# Altium footprint library CHIP-Library.PcbLib: 345 footprints (part 16 of 22)
Each footprint in its own frame and in the unit in brackets; x right, y up, seen from the top. Pads: shape width x height; smd on the part's side, far side on the other; paste and mask are expansions set on the pad; w line width, h text height; cw(c..) or ccw(c..) is an arc to the next point about the centre after c.
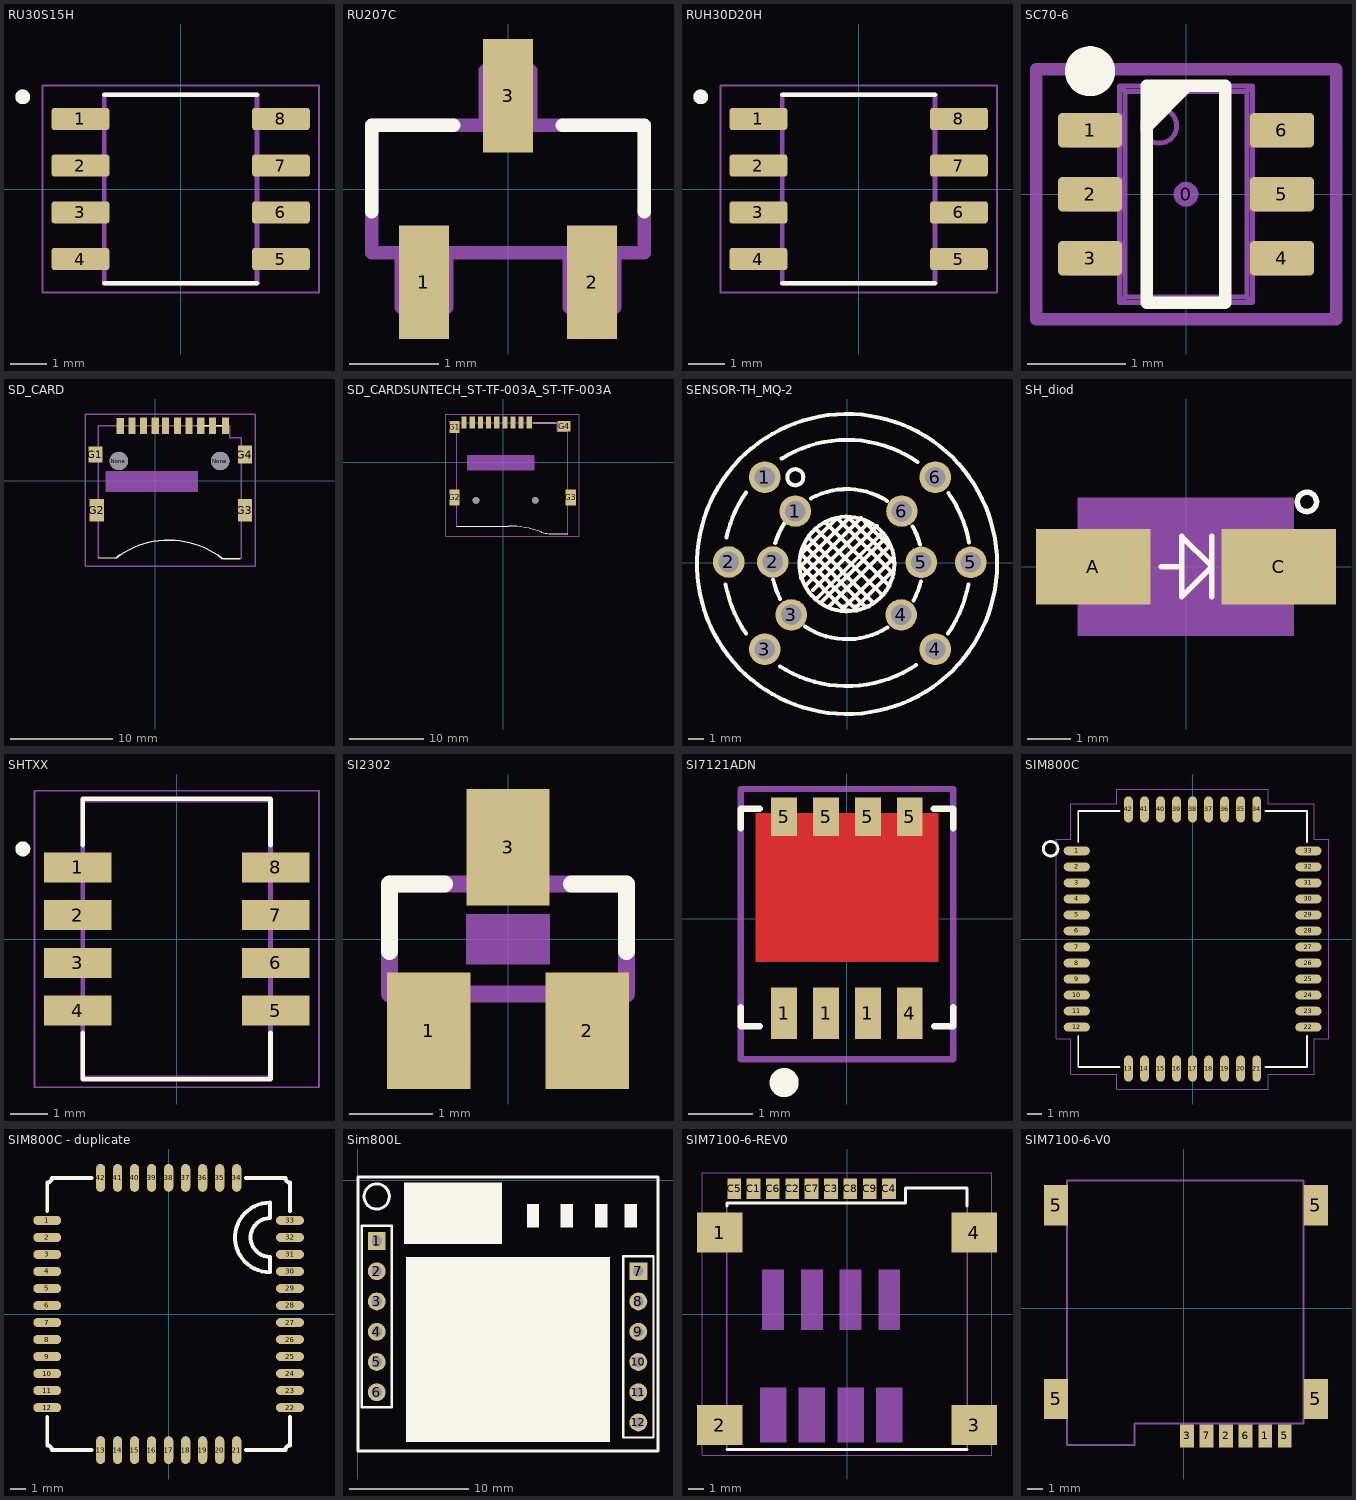
[diagram p15: the footprints below, top view; thin cyan lines are the x and y axes]

## RU30S15H [mm] "DUAL P Mosfet SOP-8"
pads (8):
  rrect25% 1.57x0.6 smd: 1(-2.725,1.905) 2(-2.725,0.635) 3(-2.725,-0.635) 4(-2.725,-1.905) 5(2.725,-1.905) 6(2.725,-0.635) 7(2.725,0.635) 8(2.725,1.905)
Top Overlay:
  circle w0.2: c-4.295,2.505 r0.1
  lines w0.127: -2.075,-2.565 2.075,-2.565 ; -2.075,2.565 2.075,2.565
Mechanical 13:
  circle w0.2: c-4.295,2.505 r0.1
  lines w0.127: -2.075,-2.565 2.075,-2.565 2.075,2.565 -2.075,2.565 -2.075,-2.565
Mechanical 15:
  lines w0.05: -3.76,-2.815 3.76,-2.815 3.76,2.815 -3.76,2.815 -3.76,-2.815
3D body "step_temp.STEP": height 1.79, standoff -0.01, extent -3,-2.46 3,2.46

## RU207C [mil] "N-Channel Advanced Power MOSFET  SOT23-3"
pads (3):
  rect 22x50 smd: 1(-37,-41) 2(37,-41) 3(0,41)
Top Overlay:
  lines w6: -60,-10 -60,28 -24,28 ; 24,28 60,28 60,-10
Mechanical 4:
  lines w6: -60,-28 -60,28 ; -60,-28 60,-28 ; -60,-28 -60,28 ; -60,-28 60,-28 ; -60,28 60,28 ; -60,28 60,28 ; -47,-52 -27,-52 ; -47,-52 -47,-28 ; -47,-52 -27,-52 ; -47,-52 -47,-28 ; -47,-28 -27,-28 ; -47,-28 -27,-28 ; -27,-52 -27,-28 ; -27,-52 -27,-28 ; -10,28 -10,52 ; -10,28 10,28 ; -10,28 -10,52 ; -10,28 10,28 ; -10,52 10,52 ; -10,52 10,52 ; 10,28 10,52 ; 10,28 10,52 ; 27,-52 47,-52 ; 27,-52 27,-28 ; 27,-52 47,-52 ; 27,-52 27,-28 ; 27,-28 47,-28 ; 27,-28 47,-28 ; 47,-52 47,-28 ; 47,-52 47,-28 ; 60,-28 60,28 ; 60,-28 60,28
3D body "CircuitWorks-SOT-23.step": height 43.81, standoff 0.5, extent -59.06,-54.21 59.05,44.21

## RUH30D20H [mm] "DUAL P Mosfet SOP-8"
pads (8):
  rrect25% 1.57x0.6 smd: 1(-2.725,1.905) 2(-2.725,0.635) 3(-2.725,-0.635) 4(-2.725,-1.905) 5(2.725,-1.905) 6(2.725,-0.635) 7(2.725,0.635) 8(2.725,1.905)
Top Overlay:
  circle w0.2: c-4.295,2.505 r0.1
  lines w0.127: -2.075,-2.565 2.075,-2.565 ; -2.075,2.565 2.075,2.565
Mechanical 13:
  circle w0.2: c-4.295,2.505 r0.1
  lines w0.127: -2.075,-2.565 2.075,-2.565 2.075,2.565 -2.075,2.565 -2.075,-2.565
Mechanical 15:
  lines w0.05: -3.76,-2.815 3.76,-2.815 3.76,2.815 -3.76,2.815 -3.76,-2.815
3D body "step_temp.STEP": height 1.79, standoff -0.01, extent -3,-2.46 3,2.46

## SC70-6 [mm] "SC70-6; SOT-363"
height 1.6
pads (7):
  round 0.254 on Mech15: 0(0,0)
  rrect25% 0.65x0.35 smd: 1(-0.975,0.65) 2(-0.975,0) 3(-0.975,-0.65) 4(0.975,-0.65) 5(0.975,0) 6(0.975,0.65)
Top Overlay:
  circle w0.254: c-0.975,1.25 r0.127
  region: 0.1,1.1 -0.4,0.6 -0.4,1.1
  lines w0.127: -0.4,-1.1 0.4,-1.1 0.4,1.1 -0.4,1.1 -0.4,-1.1
Mechanical 13:
  circle w0.05: c-0.27,0.695 r0.175
  lines w0.05: -1.028,-0.8 -1.028,-0.5 ; -1.028,-0.15 -1.028,0.15 ; -1.028,0.5 -1.028,0.8 ; -0.937,-0.8 -0.937,-0.5 ; -0.937,-0.15 -0.937,0.15 ; -0.937,0.5 -0.937,0.8 ; -0.925,-0.8 -0.925,-0.5 ; -0.925,-0.15 -0.925,0.15 ; -0.925,0.5 -0.925,0.8 ; 0.925,-0.8 0.925,-0.5 ; 0.925,-0.15 0.925,0.15 ; 0.925,0.5 0.925,0.8 ; 0.937,-0.8 0.937,-0.5 ; 0.937,-0.15 0.937,0.15 ; 0.937,0.5 0.937,0.8 ; 1.028,-0.8 1.028,-0.5 ; 1.028,-0.15 1.028,0.15 ; 1.028,0.5 1.028,0.8 ; -0.675,-1.1 -0.619,-1.044 ; -0.675,-1.1 -0.675,1.1 ; -0.675,-1.1 0.675,-1.1 ; -0.675,1.1 -0.619,1.044 ; -0.675,1.1 0.675,1.1 ; -0.619,-1.044 -0.619,1.044 ; -0.619,-1.044 0.619,-1.044 ; -0.619,1.044 0.619,1.044 ; 0.619,-1.044 0.619,1.044 ; 0.619,-1.044 0.675,-1.1 ; 0.619,1.044 0.675,1.1 ; 0.675,-1.1 0.675,1.1 ; -1.2,-0.8 -0.654,-0.8 -0.654,-0.5 -1.2,-0.5 -1.2,-0.8 ; -1.2,-0.15 -0.654,-0.15 -0.654,0.15 -1.2,0.15 -1.2,-0.15 ; -1.2,0.5 -0.654,0.5 -0.654,0.8 -1.2,0.8 -1.2,0.5 ; 0.654,-0.8 0.654,-0.5 1.2,-0.5 1.2,-0.8 0.654,-0.8 ; 0.654,-0.15 0.654,0.15 1.2,0.15 1.2,-0.15 0.654,-0.15 ; 0.654,0.5 0.654,0.8 1.2,0.8 1.2,0.5 0.654,0.5
Mechanical 15:
  lines w0.127: -1.524,-1.27 1.524,-1.27 1.524,1.27 -1.524,1.27 -1.524,-1.27
3D body "SOT363.STEP": height 1.1, standoff 0, extent -1.2,-1.1 1.2,1.1

## SD_CARD [mm]
pads (16):
  rect 0.7x1.6 smd: 1(4.445,5.334) 2(3.302,5.334) 3(2.159,5.334) 4(1.016,5.334) 5(0,5.334) 6(-1.143,5.334) 7(-2.286,5.334) 8(-3.429,5.33) CD1(6.858,5.334) CD2(5.588,5.334)
  rect 1.4x1.6 smd: G1(-5.842,2.54)
  rect 1.4x2.2 smd: G2(-5.715,-2.921) G3(8.763,-2.921)
  rect 1.4x1.8 smd: G4(8.763,2.54)
  round 1.8 hole 1.8 unplated: None(-3.556,1.905) None(6.35,1.905)
Top Overlay:
  lines w0.127: -5.535,-7.536 -3.825,-7.575 ; -3.824,-7.556 cw(c1.321,-14.322) 6.554,-7.624 ; 4.07,5.33 7.17,5.33 ; 6.604,-7.624 8.318,-7.624
Mechanical 1:
  region: 4.173,0.927 4.173,-1.076 -4.836,-1.076 -4.836,0.927
  lines w0.127: -5.588,-7.575 -5.588,5.33 7.302,5.33 7.302,4.187 8.382,4.187 8.382,-7.624 ; -6.858,-8.382 9.779,-8.382 9.779,6.5 -6.858,6.5 -6.858,-8.382
3D body "User Library-Socket-MicroSD-Type1.step": height 1.71, standoff -0.54, extent -5.653,-7.574 8.447,6.026

## SD_CARDSUNTECH_ST-TF-003A_ST-TF-003A [mm]
pads (15):
  rect 0.7x1.6 smd: 1(3.52,5.33) 2(2.42,5.33) 3(1.32,5.33) 4(0.22,5.33) 5(-0.88,5.33) 6(-1.98,5.33) 7(-3.08,5.33) 8(-4.18,5.33) 9(-5.28,5.33)
  rect 1.4x1.6 smd: G1(-6.58,4.73)
  rect 1.4x2.2 smd: G2(-6.58,-4.77) G3(9.12,-4.77)
  rect 1.8x1.4 smd: G4(8.22,4.83)
  round 0.9 hole 0.9 unplated: None(-3.68,-5.17) None(4.32,-5.17)
Top Overlay:
  lines w0.127: -6.287,-8.64 0.647,-8.64 cw(c0.647,-21.34) 5.198,-9.484 ; 4.07,5.33 7.17,5.33 ; 5.161,-9.469 ccw(c6.168,-6.847) 6.168,-9.656 8.699,-9.656
Mechanical 1:
  region: 4.173,0.927 4.173,-1.076 -4.836,-1.076 -4.836,0.927
  lines w0.127: -6.287,-8.64 -6.287,5.33 7.302,5.33 7.302,4.187 8.699,4.187 8.699,-9.656 ; -7.75,-10 -7.75,6.5 10.25,6.5 10.25,-10 -7.75,-10
3D body "User Library-XKXFS-N02-XXT.STEP": height 1.78, standoff -0.62, extent -6.93,-9.412 9.47,5.588
3D body "User Library-Micro_SD.step": height 1.46, standoff 0.48, extent -4.712,-11.107 6.288,3.893

## SENSOR-TH_MQ-2 [mm]
pads (12):
  round 2 hole 1.3 paste-2539.97 mask+0.051: 1(-5.207,5.43) 1(-3.277,3.289) 2(-7.493,0.064) 2(-4.699,0.064) 3(-5.207,-5.461) 3(-3.531,-3.289) 4(3.429,-3.289) 4(5.588,-5.461) 5(4.699,0.038) 5(7.833,0.038) 6(3.48,3.289) 6(5.588,5.43)
Top Overlay:
  circle w0.254: c0,-0.064 r9.5
  circle w0.254: c-3.277,5.43 r0.508
  circle w0.254: c0,-0.064 r3
  lines w0.254: -7.682,-1.355 ccw(c0,0) -6.39,-4.474 ; -7.63,1.622 cw(c0,0) -6.39,4.474 ; -4.674,-1.041 ccw(c0,-0.063) -4.235,-2.269 ; -4.544,1.267 cw(c0,-0.064) -3.988,2.489 ; -4.248,-6.542 ccw(c0,0) 4.362,-6.466 ; -4.133,6.615 cw(c0,0) 4.474,6.389 ; -2.911,-0.963 0.899,2.847 ; -2.667,-4.013 ccw(c0,-0.063) 2.574,-4.074 ; -2.657,-1.471 1.407,2.593 ; -2.657,1.069 1.153,-2.741 1.407,-2.741 ; -2.403,1.577 1.661,-2.487 ; -2.276,4.093 cw(c0,-0.063) 2.54,3.937 ; -2.149,-1.725 1.915,2.339 ; -1.895,-2.233 2.169,1.831 ; -1.895,2.085 2.169,-1.979 ; -1.641,-2.487 2.423,1.577 ; -1.387,2.593 2.677,-1.471 ; -1.133,-2.741 2.677,1.069 1.153,2.593 ; -0.371,-2.741 -0.117,-2.741 2.931,0.307 ; 0.137,-2.995 -0.117,-2.995 -2.911,-0.201 0.137,2.847 2.931,0.053 ; 0.391,-2.741 0.645,-2.741 2.931,-0.455 ; 0.645,-2.995 -2.911,0.561 -0.625,2.847 2.931,-0.709 ; 4.161,2.297 cw(c0,-0.063) 4.623,1.168 ; 4.216,-2.362 ccw(c0,-0.063) 4.673,-1.17 ; 6.39,-4.474 ccw(c0,0) 7.682,-1.355 ; 6.43,4.421 cw(c0.041,-0.053) 7.722,1.301
3D body "User Library-MQ-5.step": height 31.06, standoff 8, extent -9.5,-9.551 9.5,9.424
3D body "User Library-socket-7.step": height 12.16, standoff -3.48, extent -8.363,-8.436 8.637,8.543

## SH_diod [mm]
pads (2):
  rect 2.65x1.75 smd: A(-2.15,0) C(2.15,0)
Top Overlay:
  circle w0.127: c2.8,1.5 r0.224
  lines w0.127: -0.573,0 -0.1,0 ; 0.6,-0.7 0.6,0 ; 0.6,0.7 0.6,0 ; -0.1,0 -0.1,-0.7 0.6,0 ; -0.1,0 -0.1,0.7 0.6,0
Mechanical 4:
  region: -0.501,0.9 0.5,0.9 0.5,-0.901 -0.501,-0.901
  region: -0.501,0.9 0.5,0.9 0.5,-0.901 -0.501,-0.901
  lines w0.127: -2.375,-1.475 -2.375,1.475 ; -2.375,-1.475 2.375,-1.475 ; -2.375,-1.475 -2.375,1.475 ; -2.375,-1.475 2.375,-1.475 ; -2.375,1.475 2.375,1.475 ; -2.375,1.475 2.375,1.475 ; 2.375,-1.475 2.375,1.475 ; 2.375,-1.475 2.375,1.475
Mechanical 16:
  region: -2.502,1.6 2.5,1.6 2.5,-1.601 -2.502,-1.601
3D body "User Library-DFLS220-POWERDI-123.step": height 1.16, standoff 0.01, extent -1.75,-0.89 2.15,0.89

## SHTXX [mm]
pads (8):
  rect 1.8x0.8 smd: 1(-2.64,1.905) 2(-2.64,0.635) 3(-2.64,-0.635) 4(-2.64,-1.905) 5(2.64,-1.905) 6(2.64,-0.635) 7(2.64,0.635) 8(2.64,1.905)
Top Overlay:
  circle w0.2: c-4.1,2.4 r0.1
  lines w0.127: -2.5,-2.5 -2.5,-3.735 2.5,-3.735 2.5,-2.5 ; -2.5,2.5 -2.5,3.735 2.5,3.735 2.5,2.5
Mechanical 4:
  lines w0.127: -2.5,-3.7 2.5,-3.7 ; -2.5,-3.7 -2.5,3.7 ; -2.5,-3.7 2.5,-3.7 ; -2.5,-3.7 -2.5,3.7 ; -2.5,3.7 2.5,3.7 ; -2.5,3.7 2.5,3.7 ; 2.5,-3.7 2.5,3.7 ; 2.5,-3.7 2.5,3.7
Mechanical 16:
  lines w0.05: -3.79,-3.95 -3.79,3.95 3.79,3.95 3.79,-3.95 -3.79,-3.95
3D body "User Library-SHT1x.step": height 2.36, standoff 0, extent -2.413,-3.735 2.517,3.735

## SI2302 [mm]
pads (3):
  rect 1x1.4 smd: 1(-0.95,-1.1) 2(0.95,-1.1) 3(0,1.1)
Top Overlay:
  lines w0.203: -1.422,-0.152 -1.422,0.66 -0.764,0.66 ; 0.764,0.66 1.422,0.66 1.422,-0.152
Mechanical 4:
  region: -0.5,0.3 0.5,0.3 0.5,-0.3 -0.5,-0.3
  region: -0.229,1.295 0.229,1.295 0.229,0.712 -0.229,0.712
  region: 0.711,-0.711 1.168,-0.711 1.168,-1.295 0.711,-1.295
  region: -1.169,-0.711 -0.711,-0.711 -0.711,-1.296 -1.169,-1.296
  region: -0.5,0.3 0.5,0.3 0.5,-0.3 -0.5,-0.3
  region: -0.229,1.295 0.229,1.295 0.229,0.712 -0.229,0.712
  region: 0.711,-0.711 1.168,-0.711 1.168,-1.295 0.711,-1.295
  region: -1.169,-0.711 -0.711,-0.711 -0.711,-1.296 -1.169,-1.296
  lines w0.203: -1.422,-0.66 1.422,-0.66 ; -1.422,-0.66 -1.422,0.66 ; -1.422,-0.66 1.422,-0.66 ; -1.422,-0.66 -1.422,0.66 ; -1.422,0.66 1.422,0.66 ; -1.422,0.66 1.422,0.66 ; 1.422,-0.66 1.422,0.66 ; 1.422,-0.66 1.422,0.66
3D body "CircuitWorks-SOT-23.step": height 1.11, standoff 0.01, extent -1.5,-1.377 1.5,1.123

## SI7121ADN [mm] "PDFN3X3-8"
pads (8):
  rect 0.4x0.8 smd: 1(-0.975,-1.465) 1(-0.325,-1.465) 1(0.325,-1.465) 4(0.975,-1.465)
  rect 0.4x0.6 smd: 5(-0.975,1.585) 5(-0.325,1.585) 5(0.325,1.585) 5(0.975,1.585)
Top Layer:
  region: -1.415,-0.665 1.415,-0.665 1.415,1.635 -1.415,1.635
Top Overlay:
  circle w0.25: c-0.975,-2.54 r0.1
  lines w0.1: -1.65,-1.368 -1.65,-1.668 -1.35,-1.668 ; -1.65,1.406 -1.65,1.706 -1.35,1.706 ; 1.35,1.706 1.65,1.706 1.65,1.406 ; 1.351,-1.668 1.651,-1.668 1.651,-1.368
Top Paste:
  region: 0.125,-0.664 1.415,-0.664 1.415,1.636 0.125,1.636
  region: -1.415,-0.665 -0.125,-0.665 -0.125,1.635 -1.415,1.635
Top Solder:
  region: 0.125,-0.664 1.415,-0.664 1.415,1.636 0.125,1.636
  region: -1.415,-0.665 -0.125,-0.665 -0.125,1.635 -1.415,1.635
Mechanical 15:
  lines w0.1: -1.65,-2.176 1.65,-2.176 1.65,2.015 -1.65,2.015 -1.65,-2.176
3D body "CSD17575Q3.STEP": height 1.1, standoff 0, extent -1.65,-1.65 1.65,1.65

## SIM800C [mm]
pads (42):
  oval 1.8x0.6 smd: 1(-7.95,6.05) 2(-7.95,4.95) 3(-7.95,3.85) 4(-7.95,2.75) 5(-7.95,1.65) 6(-7.95,0.55) 7(-7.95,-0.55) 8(-7.95,-1.65) 9(-7.95,-2.75) 10(-7.95,-3.85) 11(-7.95,-4.95) 12(-7.95,-6.05) 22(7.95,-6.05) 23(7.95,-4.95) 24(7.95,-3.85) 25(7.95,-2.75) 26(7.95,-1.65) 27(7.95,-0.55) 28(7.95,0.55) 29(7.95,1.65) 30(7.95,2.75) 31(7.95,3.85) 32(7.95,4.95) 33(7.95,6.05)
  oval 0.6x1.8 smd: 13(-4.4,-8.9) 14(-3.3,-8.9) 15(-2.2,-8.9) 16(-1.1,-8.9) 17(0,-8.9) 18(1.1,-8.9) 19(2.2,-8.9) 20(3.3,-8.9) 21(4.4,-8.9) 34(4.4,8.9) 35(3.3,8.9) 36(2.2,8.9) 37(1.1,8.9) 38(0,8.9) 39(-1.1,8.9) 40(-2.2,8.9) 41(-3.3,8.9) 42(-4.4,8.9)
Top Overlay:
  circle w0.2: c-9.75,6.2 r0.5
  lines w0.127: -7.85,-6.65 -7.85,-8.8 -5,-8.8 ; -7.85,6.65 -7.85,8.8 -5,8.8 ; 5,-8.8 7.85,-8.8 7.85,-6.65 ; 5,8.8 7.85,8.8 7.85,6.65
Mechanical 16:
  lines w0.05: -9.35,-6.85 -8.35,-6.85 -8.35,-9.3 -5.2,-9.3 -5.2,-10.3 5.2,-10.3 5.2,-9.3 8.35,-9.3 8.35,-6.85 9.35,-6.85 9.35,6.85 8.35,6.85 8.35,9.3 5.2,9.3 5.2,10.3 -5.2,10.3 -5.2,9.3 -8.35,9.3 -8.35,6.85 -9.35,6.85 -9.35,-6.85
3D body "User Library-SIM800C-1.STEP": height 2.34, standoff 0, extent -7.826,-8.8 7.874,8.8

## SIM800C - duplicate [mm]
pads (42):
  oval 1.8x0.6 smd: 1(-7.85,6.05) 2(-7.85,4.95) 3(-7.85,3.85) 4(-7.85,2.75) 5(-7.85,1.65) 6(-7.85,0.55) 7(-7.85,-0.55) 8(-7.85,-1.65) 9(-7.85,-2.75) 10(-7.85,-3.85) 11(-7.85,-4.95) 12(-7.85,-6.05) 22(7.85,-6.05) 23(7.85,-4.95) 24(7.85,-3.85) 25(7.85,-2.75) 26(7.85,-1.65) 27(7.85,-0.55) 28(7.85,0.55) 29(7.85,1.65) 30(7.85,2.75) 31(7.85,3.85) 32(7.85,4.95) 33(7.85,6.05)
  oval 0.6x1.8 smd: 13(-4.4,-8.8) 14(-3.3,-8.8) 15(-2.2,-8.8) 16(-1.1,-8.8) 17(0,-8.8) 18(1.1,-8.8) 19(2.2,-8.8) 20(3.3,-8.8) 21(4.4,-8.8) 34(4.4,8.8) 35(3.3,8.8) 36(2.2,8.8) 37(1.1,8.8) 38(0,8.8) 39(-1.1,8.8) 40(-2.2,8.8) 41(-3.3,8.8) 42(-4.4,8.8)
Top Overlay:
  lines w0.254: -7.85,-6.65 -7.85,-8.5 cw(c-7.85,-8.8) -7.55,-8.8 -5,-8.8 ; -7.85,6.65 -7.85,8.5 ccw(c-7.85,8.8) -7.55,8.8 -5,8.8 ; 5,-8.8 7.55,-8.8 cw(c7.85,-8.8) 7.85,-8.5 7.85,-6.65 ; 5,8.8 7.55,8.8 ccw(c7.85,8.8) 7.85,8.5 7.85,6.65 ; 6.55,2.7 cw(c6.55,4.95) 6.55,7.2 6.55,6.2 ccw(c6.55,4.95) 6.55,3.7 6.55,2.7
3D body "User Library-SIM800C-1.STEP": height 2.37, standoff 0.03, extent -7.85,-8.8 7.85,8.8

## Sim800L [mm]
pads (12):
  rect 1.5x1.5 hole 0.9: 1(1.6,-5.105) 7(23.571,-7.645)
  round 1.5 hole 0.9: 2(1.6,-7.645) 3(1.6,-10.185) 4(1.6,-12.725) 5(1.6,-15.265) 6(1.6,-17.805) 8(23.571,-10.185) 9(23.571,-12.725) 10(23.571,-15.265) 11(23.571,-17.805) 12(23.571,-20.345)
Top Overlay:
  rectangle: 14.199,-3.988 15.24,-1.981
  rectangle: 17.043,-3.988 18.085,-1.981
  rectangle: 19.939,-3.988 20.98,-1.981
  rectangle: 22.428,-3.988 23.47,-1.981
  rectangle: 4.039,-21.996 21.184,-6.452
  rectangle: 3.886,-5.359 12.116,-0.178
  lines w0.2: 0.33,-19.075 2.87,-19.075 2.87,-3.835 0.33,-3.835 0.33,-19.075 ; 22.301,-21.615 24.841,-21.615 24.841,-6.375 22.301,-6.375 22.301,-21.615
  lines w0.254: 2.657,-1.346 ccw(c1.6,-1.372) 2.658,-1.372 ; 0.025,-22.758 25.222,-22.758 25.222,0.279 0.025,0.279 0.025,-22.758
3D body "User Library-module_sim800l.STEP": height 10.1, standoff -2.4, extent 0.121,-22.997 25.121,0.137

## SIM7100-6-REV0 [mm]
pads (13):
  rect 3x2.61 smd: 1(-8.34,5.34) 2(-8.34,-7.29) 3(8.34,-7.29) 4(8.34,5.34)
  rect 0.9x1.35 smd: C1(-6.135,8.215) C2(-3.595,8.215) C3(-1.055,8.215) C4(2.755,8.215) C5(-7.405,8.215) C6(-4.865,8.215) C7(-2.325,8.215) C8(0.215,8.215) C9(1.485,8.215)
Top Overlay:
  lines w0.2: -7.875,-8.89 7.875,-8.89 ; -7.875,7.1 -7.875,7.27 3.84,7.27 3.84,8.28 7.875,8.28 7.875,7.1
Mechanical 4:
  lines w0.1: -7.875,-8.89 -7.875,7.27 ; -7.875,-8.89 7.875,-8.89 ; -7.875,-8.89 -7.875,7.27 ; -7.875,-8.89 7.875,-8.89 ; -7.875,7.27 3.84,7.27 ; -7.875,7.27 3.84,7.27 ; 3.84,7.27 3.84,8.28 ; 3.84,7.27 3.84,8.28 ; 3.84,8.28 7.875,8.28 ; 3.84,8.28 7.875,8.28 ; 7.875,-8.89 7.875,8.28 ; 7.875,-8.89 7.875,8.28
Mechanical 16:
  region: -5.695,-8.41 -3.995,-8.41 -3.995,-4.83 -5.695,-4.83
  region: -0.465,-1.03 0.935,-1.03 0.935,2.91 -0.465,2.91
  region: 1.925,-8.41 3.625,-8.41 3.625,-4.83 1.925,-4.83
  region: -5.545,-1.03 -4.145,-1.03 -4.145,2.91 -5.545,2.91
  region: 2.075,-1.03 3.475,-1.03 3.475,2.91 2.075,2.91
  region: -0.615,-8.41 1.085,-8.41 1.085,-4.83 -0.615,-4.83
  region: -3.155,-8.41 -1.455,-8.41 -1.455,-4.83 -3.155,-4.83
  region: -3.005,-1.03 -1.605,-1.03 -1.605,2.91 -3.005,2.91
  lines w0.05: -9.5,-9.25 -9.5,9.25 9.5,9.25 9.5,-9.25 -9.5,-9.25
  lines w0.1: -0.5,0 0.5,0 ; 0,-0.5 0,0.5

## SIM7100-6-V0 [mil]
pads (10):
  rect 35.43x59.06 smd: 1(208.57,-326.5) 2(108.57,-326.5) 3(8.57,-326.5) 5(258.57,-326.5) 6(158.57,-326.5) 7(58.57,-326.5)
  rect 61.42x102.76 smd: 5(-326.86,-232.01) 5(-326.86,264.06) 5(338.5,-232.01) 5(338.5,264.06)
Top Assembly:
  lines w5: -299.3,-350.12 -299.3,327.05 307,327.05 307,-295 -126.07,-295 -126.07,-350.12 -299.3,-350.12
3D body "User Library-MICRO 1_35 SIM (CD).step": height 60.97, standoff 4.21, extent -319.81,-337.52 329.8,340.03